# Altium schematic symbol library Components - 31.10.26 - 17.37.SchLib: 1 symbol
Pins are listed as number, name and electrical type; pins without a type are passive.

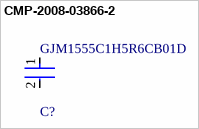
[diagram p0: symbol CMP-2008-03866-2]

## CMP-2008-03866-2
designator C?, comment GJM1555C1H5R6CB01D
Multi-Layer Ceramic Capacitor 5.6pF C0G  ±0.25pF 0402 Paper T/R; Voltage Rating: 50V; Lead Free: Lead Free; Radiation Hardening: No; Termination: SMD/SMT; Width: 0.02inch; Capacitance: 5.6pF; Thickness: 0.022inch; Depth: 0.5mm; Max Operating Temperature: 125°C; Package Quantity: 1; Case Code (Imperial): 0402; Case Code (Metric): 1005; Mount: Surface Mount; Voltage: 50V; Packaging: Tape and Reel; Length: 1mm; Voltage Rating (DC): 50V; Case/Package: 0402; Dielectric: C0G; Min Operating Temperature: -55°C; Height: 0.5mm
footprint FP-GJM155-0_05-IPC_C
footprint FP-GJM155-0_05-IPC_A
footprint FP-GJM155-0_05-IPC_B
footprint FP-GJM155-0_05-MFG
pins: 1, 2